# Altium footprint library SMD RUS IC.PcbLib: 31 footprints (part 2 of 2)
Each footprint in its own frame and in the unit in brackets; x right, y up, seen from the top. Pads: shape width x height; smd on the part's side, far side on the other; paste and mask are expansions set on the pad; w line width, h text height; cw(c..) or ccw(c..) is an arc to the next point about the centre after c.
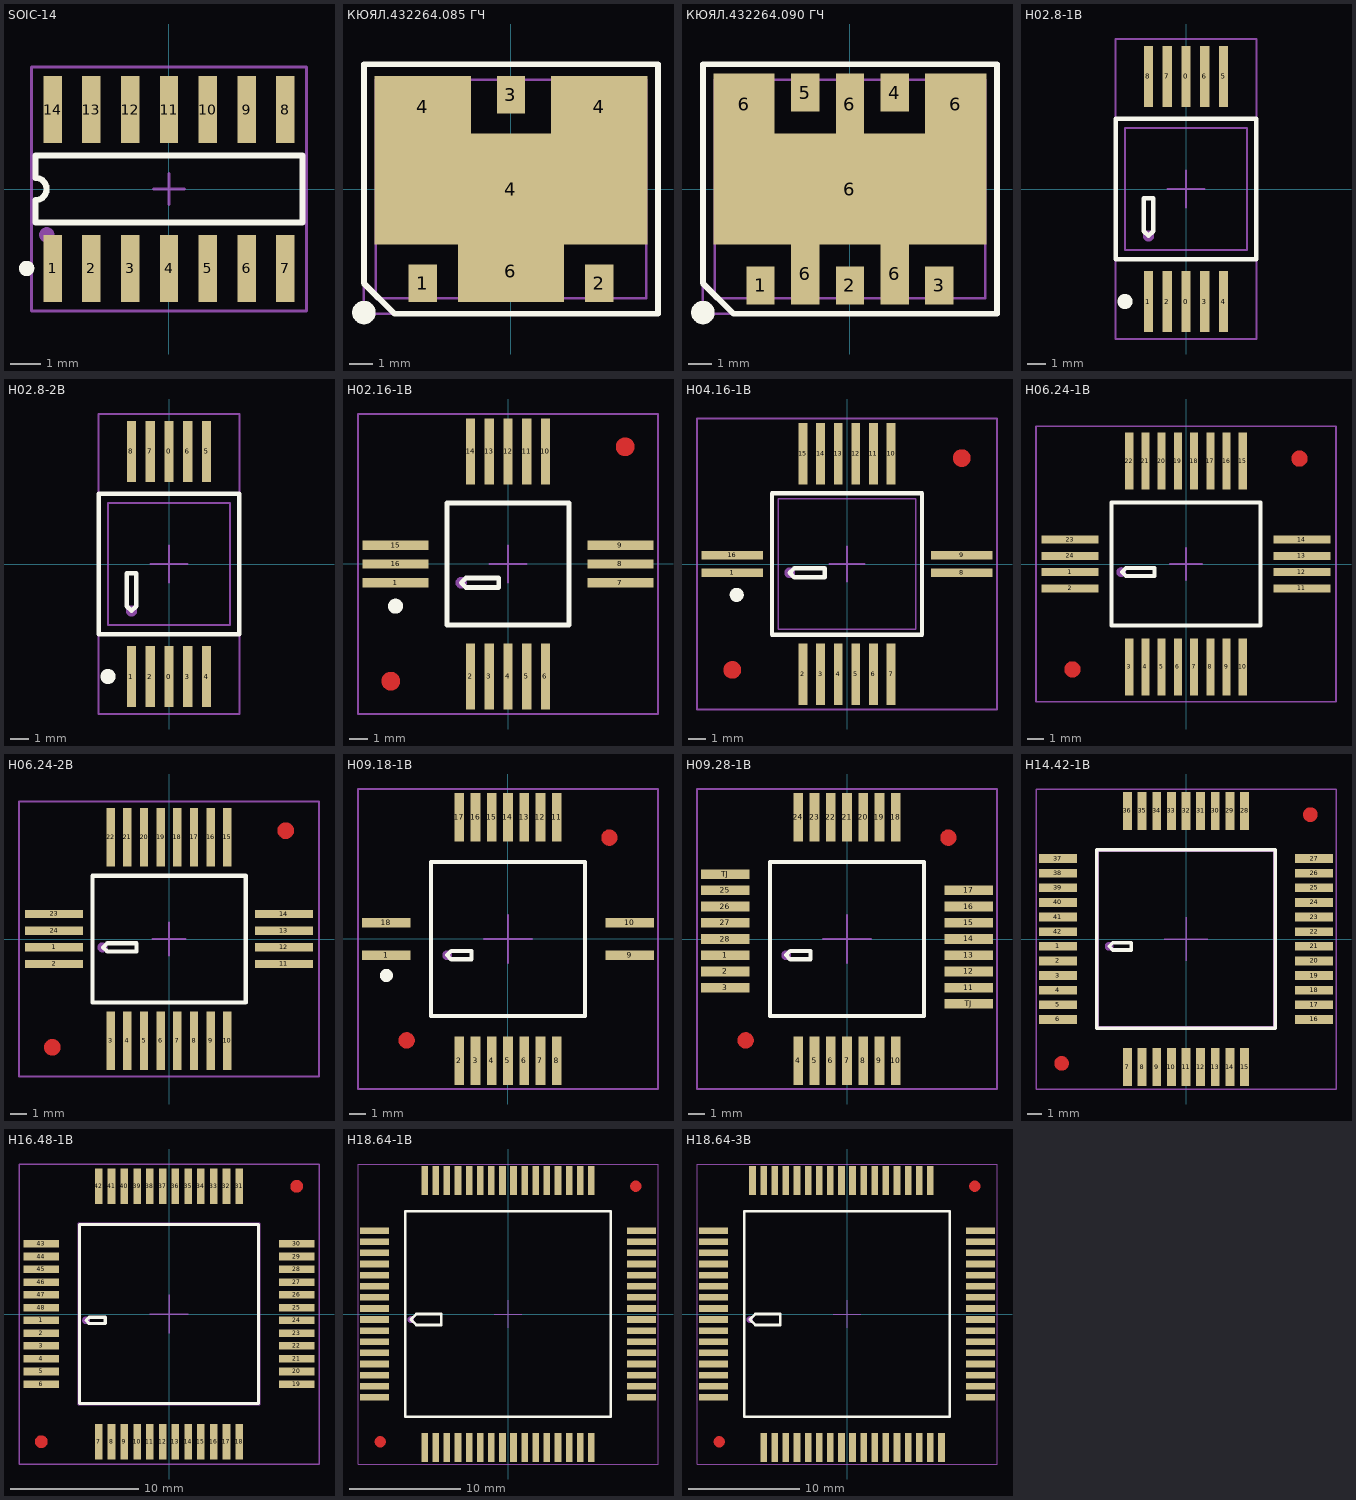
[diagram p1: the footprints below, top view; thin cyan lines are the x and y axes]

## SOIC-14 [mm] "Small Outline; 14 Leads; Body Width 3.9 mm; Pitch 1.27 mm"
height 1.75
pads (14):
  rect 0.6x2.2 smd: 1(-3.81,-2.6) 2(-2.54,-2.6) 3(-1.27,-2.6) 4(0,-2.6) 5(1.27,-2.6) 6(2.54,-2.6) 7(3.81,-2.6) 8(3.81,2.6) 9(2.54,2.6) 10(1.27,2.6) 11(0,2.6) 12(-1.27,2.6) 13(-2.54,2.6) 14(-3.81,2.6)
Top Overlay:
  circle w0.25: c-4.66,-2.6 r0.125
  lines w0.2: -4.375,-1.1 4.375,-1.1 4.375,1.1 -4.375,1.1 -4.375,0.367 cw(c-4.375,0) -4.375,-0.367 -4.375,-1.1
Mechanical 7:
  lines w0.05: -4.5,-4 -4.5,4 4.5,4 4.5,-4 -4.5,-4
  text ".Designator" at -1.5,-0.5 h1.5
Mechanical 13:
  circle w0.25: c-4,-1.5 r0.125
Mechanical 15:
  lines w0.1: -0.5,0 0.5,0 ; 0,-0.5 0,0.5 ; -4.5,-4 4.5,-4 4.5,4 -4.5,4 -4.5,-4
3D body "SOIC14N.step": height 1.7, standoff 0, extent -4.318,-3.023 4.318,3.175

## КЮЯЛ.432264.085 ГЧ [mm]
height 2.5
pads (7):
  rect 1.2x1.6 smd: 1(-3.75,-4) 2(3.75,-4) 3(0,4)
  rect 4.1x2.6 smd: 4(-3.75,3.5) 4(3.75,3.5)
  rect 11.6x4.7 smd: 4(0,0)
  rect 4.5x2.6 smd: 6(0,-3.5)
Top Overlay:
  circle w0.5: c-6.25,-5.25 r0.25
  lines w0.25: -6.25,-4 -4.95,-5.3 6.25,-5.3 6.25,5.3 -6.25,5.3 -6.25,-4
Mechanical 7:
  lines w0.05: -6.25,-5.3 6.25,-5.3 6.25,5.3 -6.25,5.3 -6.25,-5.3
  text ".Designator" at -2.999,-0.5 h2
Mechanical 13:
  circle w0.3: c-3.75,-4 r0.15
  lines w0.1: -5.75,-4.65 -5.75,4.65 5.75,4.65 5.75,-4.65 -5.75,-4.65
  text "Check!" at -3.75,-0.25 h1.52
Mechanical 15:
  lines w0.1: -1,0 1,0 ; 0,-1 0,1 ; -6.25,-5.3 6.25,-5.3 6.25,5.3 -6.25,5.3 -6.25,-5.3
3D body: height 2.2, standoff 2, extent -5.75,-4.65 5.75,4.65
3D body: height 2.6, standoff 2.2, extent -5.25,-4 5.25,4
3D body: height 2, standoff 0.01, extent -5.75,-4.65 5.75,4.65
3D body: height 2, standoff 0.01, extent 1.4,-4.7 2.4,-4.625
3D body: height 1, standoff 0.01, extent -0.5,-4.7 0.5,-4.625
3D body: height 1, standoff 0.01, extent 3.3,-4.7 4.3,-4.625
3D body: height 2, standoff 0.01, extent -5.712,4.625 -3.288,4.7
3D body: height 1, standoff 0.01, extent -2.4,4.625 -1.4,4.7
3D body: height 1, standoff 0.01, extent 1.4,4.625 2.4,4.7
3D body: height 2, standoff 0.01, extent -0.5,4.625 0.5,4.7
3D body: height 2, standoff 0.01, extent 3.287,4.625 5.713,4.7
3D body: height 2, standoff 0.01, extent -2.4,-4.7 -1.4,-4.625
3D body: height 1, standoff 0.01, extent -4.3,-4.7 -3.3,-4.625

## КЮЯЛ.432264.090 ГЧ [mm]
height 2.5
pads (11):
  rect 1.2x1.6 smd: 1(-3.8,-4.1) 2(0,-4.1) 3(3.8,-4.1) 4(1.9,4.1) 5(-1.9,4.1)
  rect 2.6x2.6 smd: 6(-4.5,3.6) 6(4.5,3.6)
  rect 1.2x2.6 smd: 6(-1.9,-3.6) 6(0,3.6) 6(1.9,-3.6)
  rect 11.6x4.7 smd: 6(0,0)
Top Overlay:
  circle w0.5: c-6.25,-5.25 r0.25
  lines w0.25: -6.25,-4 -6.25,5.3 6.25,5.3 6.25,-5.3 -4.95,-5.3 -6.25,-4
Mechanical 7:
  lines w0.05: -6.25,-5.3 6.25,-5.3 6.25,5.3 -6.25,5.3 -6.25,-5.3
  text ".Designator" at -2.999,-0.5 h2
Mechanical 13:
  circle w0.3: c-3.75,-4 r0.15
  lines w0.1: -5.75,-4.65 5.75,-4.65 5.75,4.65 -5.75,4.65 -5.75,-4.65
Mechanical 15:
  lines w0.1: -1,0 1,0 ; 0,-1 0,1 ; -6.25,-5.3 -6.25,5.3 6.25,5.3 6.25,-5.3 -6.25,-5.3
3D body: height 1, standoff 0.01, extent -4.3,-4.7 -3.3,-4.625
3D body: height 2, standoff 0.01, extent -2.4,-4.7 -1.4,-4.625
3D body: height 2, standoff 0.01, extent 3.287,4.625 5.713,4.7
3D body: height 2, standoff 0.01, extent -0.5,4.625 0.5,4.7
3D body: height 1, standoff 0.01, extent 1.4,4.625 2.4,4.7
3D body: height 1, standoff 0.01, extent -2.4,4.625 -1.4,4.7
3D body: height 2, standoff 0.01, extent -5.712,4.625 -3.288,4.7
3D body: height 1, standoff 0.01, extent 3.3,-4.7 4.3,-4.625
3D body: height 1, standoff 0.01, extent -0.5,-4.7 0.5,-4.625
3D body: height 2, standoff 0.01, extent 1.4,-4.7 2.4,-4.625
3D body: height 2, standoff 0.01, extent -5.75,-4.65 5.75,4.65
3D body: height 2.6, standoff 2.2, extent -5.25,-4 5.25,4
3D body: height 2.2, standoff 2, extent -5.75,-4.65 5.75,4.65

## Н02.8-1В [mm]
height 2.9
pads (10):
  rect 0.5x3.25 smd: 0(0,-6) 0(0,6) 1(-2,-6) 2(-1,-6) 3(1,-6) 4(2,-6) 5(2,6) 6(1,6) 7(-1,6) 8(-2,6)
Top Overlay:
  circle w0.4: c-3.25,-6 r0.2
  lines w0.25: -3.75,-3.75 3.75,-3.75 3.75,3.75 -3.75,3.75 -3.75,-3.75 ; -2.25,-2.25 -2,-2.5 -1.75,-2.25 -1.75,-0.5 -2.25,-0.5 -2.25,-2.25
Mechanical 7:
  lines w0.05: -3.75,-8 3.75,-8 3.75,8 -3.75,8 -3.75,-8
  text ".Designator" at -2.999,-0.5 h2
Mechanical 13:
  circle w0.3: c-2,-2.5 r0.15
  lines w0.1: -3.25,-3.25 -3.25,3.25 3.25,3.25 3.25,-3.25 -3.25,-3.25
Mechanical 15:
  lines w0.1: -1,0 1,0 ; 0,-1 0,1 ; -3.75,-8 -3.75,8 3.75,8 3.75,-8 -3.75,-8
3D body "Н02.8-1В.STEP": height 3.1, standoff 0.2, extent -3.25,-7.5 3.25,7.5

## Н02.8-2В [mm]
height 2.9
pads (10):
  rect 0.5x3.25 smd: 0(0,-6) 0(0,6) 1(-2,-6) 2(-1,-6) 3(1,-6) 4(2,-6) 5(2,6) 6(1,6) 7(-1,6) 8(-2,6)
Top Overlay:
  circle w0.4: c-3.25,-6 r0.2
  lines w0.25: -3.75,-3.75 -3.75,3.75 3.75,3.75 3.75,-3.75 -3.75,-3.75 ; -2.25,-2.25 -2.25,-0.5 -1.75,-0.5 -1.75,-2.25 -2,-2.5 -2.25,-2.25
Mechanical 7:
  lines w0.05: -3.75,-8 3.75,-8 3.75,8 -3.75,8 -3.75,-8
  text ".Designator" at -2.999,-0.5 h2
Mechanical 13:
  circle w0.3: c-2,-2.5 r0.15
  lines w0.1: -3.25,-3.25 3.25,-3.25 3.25,3.25 -3.25,3.25 -3.25,-3.25
Mechanical 15:
  lines w0.1: -1,0 1,0 ; 0,-1 0,1 ; -3.75,-8 3.75,-8 3.75,8 -3.75,8 -3.75,-8
3D body "Н02.8-1В.STEP": height 3.1, standoff 0.2, extent -3.25,-7.5 3.25,7.5

## Н02.16-1В [mm]
height 3
pads (16):
  rect 3.5x0.5 smd: 1(-6,-1) 7(6,-1) 8(6,0) 9(6,1) 15(-6,1) 16(-6,0)
  rect 0.5x3.5 smd: 2(-2,-6) 3(-1,-6) 4(0,-6) 5(1,-6) 6(2,-6) 10(2,6) 11(1,6) 12(0,6) 13(-1,6) 14(-2,6)
Top Layer:
  circle w0.5: c6.25,6.25 r0.25
  circle w0.5: c-6.25,-6.25 r0.25
Top Overlay:
  circle w0.4: c-6,-2.25 r0.2
  lines w0.25: -3.25,-3.25 3.25,-3.25 3.25,3.25 -3.25,3.25 -3.25,-3.25 ; -2.5,-1 -2.25,-1.25 -0.5,-1.25 -0.5,-0.75 -2.25,-0.75 -2.5,-1
Top Solder:
  circle w1: c6.25,6.25 r0.5
  circle w1: c-6.25,-6.25 r0.5
Mechanical 7:
  lines w0.05: -8,-8 8,-8 8,8 -8,8 -8,-8
  text ".Designator" at -2.999,-0.5 h2
Mechanical 13:
  circle w0.3: c-2.5,-1 r0.15
  lines w0.1: -3.25,-3.25 3.25,-3.25 3.25,3.25 -3.25,3.25 -3.25,-3.25
Mechanical 15:
  lines w0.1: -1,0 1,0 ; 0,-1 0,1 ; -8,-8 -8,8 8,8 8,-8 -8,-8
3D body: height 2.2, standoff 0.01, extent -3.25,-3.25 3.25,3.25
3D body: height 2.6, standoff 2.2, extent -3,-3 3,3
3D body: height 3, standoff 2.6, extent -2.75,-2.75 2.75,2.75
3D body: height 0.2, standoff 0, extent -2.2,-7.5 -1.8,-3.25
3D body: height 0.2, standoff 0, extent -1.2,-7.5 -0.8,-3.25
3D body: height 0.2, standoff 0, extent -0.2,-7.5 0.2,-3.25
3D body: height 0.2, standoff 0, extent 1.8,-7.5 2.2,-3.25
3D body: height 0.2, standoff 0, extent 0.8,-7.5 1.2,-3.25
3D body: height 0.2, standoff 0, extent 3.25,0.8 7.5,1.2
3D body: height 0.2, standoff 0, extent 3.25,-0.2 7.5,0.2
3D body: height 0.2, standoff 0, extent 3.25,-1.2 7.5,-0.8
3D body: height 0.2, standoff 0, extent -7.5,-1.2 -3.25,-0.8
3D body: height 0.2, standoff 0, extent -7.5,-0.2 -3.25,0.2
3D body: height 0.2, standoff 0, extent -7.5,0.8 -3.25,1.2
3D body: height 0.2, standoff 0, extent -2.2,3.25 -1.8,7.5
3D body: height 0.2, standoff 0, extent -1.2,3.25 -0.8,7.5
3D body: height 0.2, standoff 0, extent -0.2,3.25 0.2,7.5
3D body: height 0.2, standoff 0, extent 1.8,3.25 2.2,7.5
3D body: height 0.2, standoff 0, extent 0.8,3.25 1.2,7.5

## Н04.16-1В [mm]
pads (16):
  rect 3.5x0.5 smd: 1(-6.5,-0.5) 8(6.5,-0.5) 9(6.5,0.5) 16(-6.5,0.5)
  rect 0.5x3.5 smd: 2(-2.5,-6.25) 3(-1.5,-6.25) 4(-0.5,-6.25) 5(0.5,-6.25) 6(1.5,-6.25) 7(2.5,-6.25) 10(2.5,6.25) 11(1.5,6.25) 12(0.5,6.25) 13(-0.5,6.25) 14(-1.5,6.25) 15(-2.5,6.25)
Top Layer:
  circle w0.5: c6.5,6 r0.25
  circle w0.5: c-6.5,-6 r0.25
Top Overlay:
  circle w0.4: c-6.25,-1.75 r0.2
  lines w0.25: -4.25,-4 -4.25,4 4.25,4 4.25,-4 -4.25,-4 ; -3.25,-0.5 -3,-0.75 -1.25,-0.75 -1.25,-0.25 -3,-0.25 -3.25,-0.5
Top Solder:
  circle w1: c6.5,6 r0.5
  circle w1: c-6.5,-6 r0.5
Mechanical 7:
  lines w0.05: -8.5,-8.25 -8.5,8.25 8.5,8.25 8.5,-8.25 -8.5,-8.25
  text ".Designator" at -2.999,-0.5 h2
Mechanical 13:
  circle w0.3: c-3.25,-0.5 r0.15
  lines w0.1: -3.9,-3.7 3.9,-3.7 3.9,3.7 -3.9,3.7 -3.9,-3.7
Mechanical 15:
  lines w0.1: -1,0 1,0 ; 0,-1 0,1 ; -8.5,-8.25 -8.5,8.25 8.5,8.25 8.5,-8.25 -8.5,-8.25
3D body "Н04.16-1В.STEP": height 2.94, standoff 0.02, extent -8,-7.84 8,7.84

## Н06.24-1В [mm]
height 3
pads (24):
  rect 3.5x0.5 smd: 1(-7.15,-0.5) 2(-7.15,-1.5) 11(7.15,-1.5) 12(7.15,-0.5) 13(7.15,0.5) 14(7.15,1.5) 23(-7.15,1.5) 24(-7.15,0.5)
  rect 0.5x3.5 smd: 3(-3.5,-6.35) 4(-2.5,-6.35) 5(-1.5,-6.35) 6(-0.5,-6.35) 7(0.5,-6.35) 8(1.5,-6.35) 9(2.5,-6.35) 10(3.5,-6.35) 15(3.5,6.35) 16(2.5,6.35) 17(1.5,6.35) 18(0.5,6.35) 19(-0.5,6.35) 20(-1.5,6.35) 21(-2.5,6.35) 22(-3.5,6.35)
Top Layer:
  circle w0.5: c-7,-6.5 r0.25
  circle w0.5: c7,6.5 r0.25
Top Overlay:
  lines w0.25: -4.6,-3.8 -4.6,3.8 4.6,3.8 4.6,-3.8 -4.6,-3.8 ; -3.95,-0.5 -3.7,-0.75 -1.95,-0.75 -1.95,-0.25 -3.7,-0.25 -3.95,-0.5
Top Solder:
  circle w1: c-7,-6.5 r0.5
  circle w1: c7,6.5 r0.5
Mechanical 7:
  lines w0.05: -9.25,-8.5 -9.25,8.5 9.25,8.5 9.25,-8.5 -9.25,-8.5
  text ".Designator" at -2.999,-0.5 h2
Mechanical 13:
  circle w0.3: c-4,-0.5 r0.15
  lines w0.1: -4.6,-3.8 4.6,-3.8 4.6,3.8 -4.6,3.8 -4.6,-3.8
Mechanical 15:
  lines w0.1: -1,0 1,0 ; 0,-1 0,1 ; -9.25,-8.5 -9.25,8.5 9.25,8.5 9.25,-8.5 -9.25,-8.5
3D body "Н06.24-1В.STEP": height 3.02, standoff 0, extent -8.74,-7.94 8.74,7.94

## Н06.24-2В [mm]
height 3
pads (24):
  rect 3.5x0.5 smd: 1(-6.9,-0.5) 2(-6.9,-1.5) 11(6.9,-1.5) 12(6.9,-0.5) 13(6.9,0.5) 14(6.9,1.5) 23(-6.9,1.5) 24(-6.9,0.5)
  rect 0.5x3.5 smd: 3(-3.5,-6.1) 4(-2.5,-6.1) 5(-1.5,-6.1) 6(-0.5,-6.1) 7(0.5,-6.1) 8(1.5,-6.1) 9(2.5,-6.1) 10(3.5,-6.1) 15(3.5,6.1) 16(2.5,6.1) 17(1.5,6.1) 18(0.5,6.1) 19(-0.5,6.1) 20(-1.5,6.1) 21(-2.5,6.1) 22(-3.5,6.1)
Top Layer:
  circle w0.5: c-7,-6.5 r0.25
  circle w0.5: c7,6.5 r0.25
Top Overlay:
  lines w0.25: -4.6,-3.8 -4.6,3.8 4.6,3.8 4.6,-3.8 -4.6,-3.8 ; -3.95,-0.5 -3.7,-0.75 -1.95,-0.75 -1.95,-0.25 -3.7,-0.25 -3.95,-0.5
Top Solder:
  circle w1: c-7,-6.5 r0.5
  circle w1: c7,6.5 r0.5
Mechanical 7:
  lines w0.05: -9,-8.25 -9,8.25 9,8.25 9,-8.25 -9,-8.25
  text ".Designator" at -2.999,-0.5 h2
Mechanical 13:
  circle w0.3: c-4,-0.5 r0.15
  lines w0.1: -4.6,-3.8 4.6,-3.8 4.6,3.8 -4.6,3.8 -4.6,-3.8
Mechanical 15:
  lines w0.1: -1,0 1,0 ; 0,-1 0,1 ; -9,-8.25 -9,8.25 9,8.25 9,-8.25 -9,-8.25
3D body: height 2.2, standoff 0.2, extent -4.6,-3.8 4.6,3.8
3D body: height 2.6, standoff 2.2, extent -4.6,-3.8 4.6,3.8
3D body: height 3, standoff 2.6, extent -4.6,-3.8 4.6,3.8
3D body: height 0.2, standoff 0, extent -3.7,-7.7 -3.3,-3.8
3D body: height 0.2, standoff 0, extent -2.7,-7.7 -2.3,-3.8
3D body: height 0.2, standoff 0, extent -1.7,-7.7 -1.3,-3.8
3D body: height 0.2, standoff 0, extent 1.3,-7.7 1.7,-3.8
3D body: height 0.2, standoff 0, extent 0.3,-7.7 0.7,-3.8
3D body: height 0.2, standoff 0, extent -0.7,-7.7 -0.3,-3.8
3D body: height 0.2, standoff 0, extent 3.3,-7.7 3.7,-3.8
3D body: height 0.2, standoff 0, extent 2.3,-7.7 2.7,-3.8
3D body: height 0.2, standoff 0, extent 4.6,1.3 8.5,1.7
3D body: height 0.2, standoff 0, extent 4.6,0.3 8.5,0.7
3D body: height 0.2, standoff 0, extent 4.6,-0.7 8.5,-0.3
3D body: height 0.2, standoff 0, extent 4.6,-1.7 8.5,-1.3
3D body: height 0.2, standoff 0, extent -8.5,-1.7 -4.6,-1.3
3D body: height 0.2, standoff 0, extent -8.5,-0.7 -4.6,-0.3
3D body: height 0.2, standoff 0, extent -8.5,0.3 -4.6,0.7
3D body: height 0.2, standoff 0, extent -8.5,1.3 -4.6,1.7
3D body: height 0.2, standoff 0, extent 2.3,3.8 2.7,7.7
3D body: height 0.2, standoff 0, extent 3.3,3.8 3.7,7.7
3D body: height 0.2, standoff 0, extent -0.7,3.8 -0.3,7.7
3D body: height 0.2, standoff 0, extent 0.3,3.8 0.7,7.7
3D body: height 0.2, standoff 0, extent 1.3,3.8 1.7,7.7
3D body: height 0.2, standoff 0, extent -1.7,3.8 -1.3,7.7
3D body: height 0.2, standoff 0, extent -2.7,3.8 -2.3,7.7
3D body: height 0.2, standoff 0, extent -3.7,3.8 -3.3,7.7

## Н09.18-1В [mm]
height 2.9
pads (18):
  rect 3x0.6 smd: 1(-7.5,-1) 9(7.5,-1) 10(7.5,1) 18(-7.5,1)
  rect 0.6x3 smd: 2(-3,-7.5) 3(-2,-7.5) 4(-1,-7.5) 5(0,-7.5) 6(1,-7.5) 7(2,-7.5) 8(3,-7.5) 11(3,7.5) 12(2,7.5) 13(1,7.5) 14(0,7.5) 15(-1,7.5) 16(-2,7.5) 17(-3,7.5)
Top Layer:
  circle w0.5: c-6.25,-6.25 r0.25
  circle w0.5: c6.25,6.25 r0.25
Top Overlay:
  circle w0.4: c-7.5,-2.25 r0.2
  lines w0.25: -4.75,-4.75 -4.75,4.75 4.75,4.75 4.75,-4.75 -4.75,-4.75 ; -3.75,-1 -3.5,-0.75 -2.25,-0.75 -2.25,-1.25 -3.5,-1.25 -3.75,-1
Top Solder:
  circle w1: c-6.25,-6.25 r0.5
  circle w1: c6.25,6.25 r0.5
Mechanical 7:
  lines w0.05: -9.25,-9.25 9.25,-9.25 9.25,9.25 -9.25,9.25 -9.25,-9.25
  text ".Designator" at -2.999,-0.5 h2
Mechanical 13:
  circle w0.3: c-3.75,-1 r0.15
  lines w0.1: -4.75,-4.75 -4.75,4.75 4.75,4.75 4.75,-4.75 -4.75,-4.75
Mechanical 15:
  lines w0.1: -1.5,0 1.5,0 ; 0,-1.5 0,1.5 ; -9.25,-9.25 -9.25,9.25 9.25,9.25 9.25,-9.25 -9.25,-9.25
3D body "Н09.18-1ВН.STEP": height 2.92, standoff 0.02, extent -8.2,-8.2 8.2,8.2

## Н09.28-1В [mm]
pads (30):
  rect 3x0.6 smd: 1(-7.5,-1) 2(-7.5,-2) 3(-7.5,-3) 11(7.5,-3) 12(7.5,-2) 13(7.5,-1) 14(7.5,0) 15(7.5,1) 16(7.5,2) 17(7.5,3) 25(-7.5,3) 26(-7.5,2) 27(-7.5,1) 28(-7.5,0) TJ(-7.5,4) TJ(7.5,-4)
  rect 0.6x3 smd: 4(-3,-7.5) 5(-2,-7.5) 6(-1,-7.5) 7(0,-7.5) 8(1,-7.5) 9(2,-7.5) 10(3,-7.5) 18(3,7.5) 19(2,7.5) 20(1,7.5) 21(0,7.5) 22(-1,7.5) 23(-2,7.5) 24(-3,7.5)
Top Layer:
  circle w0.5: c6.25,6.25 r0.25
  circle w0.5: c-6.25,-6.25 r0.25
Top Overlay:
  lines w0.25: -4.75,-4.75 4.75,-4.75 4.75,4.75 -4.75,4.75 -4.75,-4.75 ; -3.75,-1 -3.5,-1.25 -2.25,-1.25 -2.25,-0.75 -3.5,-0.75 -3.75,-1
Top Solder:
  circle w1: c6.25,6.25 r0.5
  circle w1: c-6.25,-6.25 r0.5
Mechanical 7:
  lines w0.05: -9.25,-9.25 -9.25,9.25 9.25,9.25 9.25,-9.25 -9.25,-9.25
  text ".Designator" at -2.999,-0.5 h2
Mechanical 13:
  circle w0.3: c-3.75,-1 r0.15
  lines w0.1: -4.75,-4.75 4.75,-4.75 4.75,4.75 -4.75,4.75 -4.75,-4.75
Mechanical 15:
  lines w0.1: -1.5,0 1.5,0 ; 0,-1.5 0,1.5 ; -9.25,-9.25 9.25,-9.25 9.25,9.25 -9.25,9.25 -9.25,-9.25
3D body: height 2.5, standoff 0.2, extent -4.75,-4.75 4.75,4.75
3D body: height 2.7, standoff 2.5, extent -4.25,-4.25 4.25,4.25
3D body: height 3, standoff 2.5, extent -4,-4 4,4
3D body: height 0.2, standoff 0, extent -8.75,3.75 -4.75,4.25
3D body: height 0.2, standoff 0, extent -8.75,2.75 -4.75,3.25
3D body: height 0.2, standoff 0, extent -8.75,0.75 -4.75,1.25
3D body: height 0.2, standoff 0, extent -8.75,1.75 -4.75,2.25
3D body: height 0.2, standoff 0, extent -8.75,-1.25 -4.75,-0.75
3D body: height 0.2, standoff 0, extent -8.75,-0.25 -4.75,0.25
3D body: height 0.2, standoff 0, extent -8.75,-3.25 -4.75,-2.75
3D body: height 0.2, standoff 0, extent -8.75,-2.25 -4.75,-1.75
3D body: height 0.2, standoff 0, extent 4.75,-3.25 8.75,-2.75
3D body: height 0.2, standoff 0, extent 4.75,-4.25 8.75,-3.75
3D body: height 0.2, standoff 0, extent 4.75,-1.25 8.75,-0.75
3D body: height 0.2, standoff 0, extent 4.75,-2.25 8.75,-1.75
3D body: height 0.2, standoff 0, extent 4.75,0.75 8.75,1.25
3D body: height 0.2, standoff 0, extent 4.75,-0.25 8.75,0.25
3D body: height 0.2, standoff 0, extent 4.75,1.75 8.75,2.25
3D body: height 0.2, standoff 0, extent 4.75,2.75 8.75,3.25
3D body: height 0.2, standoff 0, extent 2.75,-8.75 3.25,-4.75
3D body: height 0.2, standoff 0, extent 0.75,-8.75 1.25,-4.75
3D body: height 0.2, standoff 0, extent 1.75,-8.75 2.25,-4.75
3D body: height 0.2, standoff 0, extent -1.25,-8.75 -0.75,-4.75
3D body: height 0.2, standoff 0, extent -0.25,-8.75 0.25,-4.75
3D body: height 0.2, standoff 0, extent -2.25,-8.75 -1.75,-4.75
3D body: height 0.2, standoff 0, extent -3.25,-8.75 -2.75,-4.75
3D body: height 0.2, standoff 0, extent -3.25,4.75 -2.75,8.75
3D body: height 0.2, standoff 0, extent -2.25,4.75 -1.75,8.75
3D body: height 0.2, standoff 0, extent -0.25,4.75 0.25,8.75
3D body: height 0.2, standoff 0, extent -1.25,4.75 -0.75,8.75
3D body: height 0.2, standoff 0, extent 1.75,4.75 2.25,8.75
3D body: height 0.2, standoff 0, extent 0.75,4.75 1.25,8.75
3D body: height 0.2, standoff 0, extent 2.75,4.75 3.25,8.75

## Н14.42-1В [mm]
height 3
pads (42):
  rect 2.6x0.6 smd: 1(-8.75,-0.5) 2(-8.75,-1.5) 3(-8.75,-2.5) 4(-8.75,-3.5) 5(-8.75,-4.5) 6(-8.75,-5.5) 16(8.75,-5.5) 17(8.75,-4.5) 18(8.75,-3.5) 19(8.75,-2.5) 20(8.75,-1.5) 21(8.75,-0.5) 22(8.75,0.5) 23(8.75,1.5) 24(8.75,2.5) 25(8.75,3.5) 26(8.75,4.5) 27(8.75,5.5) 37(-8.75,5.5) 38(-8.75,4.5) 39(-8.75,3.5) 40(-8.75,2.5) 41(-8.75,1.5) 42(-8.75,0.5)
  rect 0.6x2.6 smd: 7(-4,-8.75) 8(-3,-8.75) 9(-2,-8.75) 10(-1,-8.75) 11(0,-8.75) 12(1,-8.75) 13(2,-8.75) 14(3,-8.75) 15(4,-8.75) 28(4,8.75) 29(3,8.75) 30(2,8.75) 31(1,8.75) 32(0,8.75) 33(-1,8.75) 34(-2,8.75) 35(-3,8.75) 36(-4,8.75)
Top Layer:
  circle w0.5: c8.5,8.5 r0.25
  circle w0.5: c-8.5,-8.5 r0.25
Top Overlay:
  lines w0.25: -6.1,-6.1 6.1,-6.1 6.1,6.1 -6.1,6.1 -6.1,-6.1 ; -5.25,-0.5 -5,-0.75 -3.75,-0.75 -3.75,-0.25 -5,-0.25 -5.25,-0.5
Top Solder:
  circle w1: c8.5,8.5 r0.5
  circle w1: c-8.5,-8.5 r0.5
Mechanical 7:
  lines w0.05: -10.25,-10.25 10.25,-10.25 10.25,10.25 -10.25,10.25 -10.25,-10.25
  text ".Designator" at -2.999,-0.5 h2
Mechanical 13:
  circle w0.3: c-5.25,-0.5 r0.15
  lines w0.1: -6,-6 -6,6 6,6 6,-6 -6,-6
Mechanical 15:
  lines w0.1: -1.5,0 1.5,0 ; 0,-1.5 0,1.5 ; -10.25,-10.25 10.25,-10.25 10.25,10.25 -10.25,10.25 -10.25,-10.25
3D body "User Library-H14_42-1B.step": height 3.05, standoff 0.04, extent -7.5,-7.5 7.5,7.5

## Н16.48-1В [mm]
height 3
pads (48):
  rect 2.8x0.6 smd: 1(-10,-0.5) 2(-10,-1.5) 3(-10,-2.5) 4(-10,-3.5) 5(-10,-4.5) 6(-10,-5.5) 19(10,-5.5) 20(10,-4.5) 21(10,-3.5) 22(10,-2.5) 23(10,-1.5) 24(10,-0.5) 25(10,0.5) 26(10,1.5) 27(10,2.5) 28(10,3.5) 29(10,4.5) 30(10,5.5) 43(-10,5.5) 44(-10,4.5) 45(-10,3.5) 46(-10,2.5) 47(-10,1.5) 48(-10,0.5)
  rect 0.6x2.8 smd: 7(-5.5,-10) 8(-4.5,-10) 9(-3.5,-10) 10(-2.5,-10) 11(-1.5,-10) 12(-0.5,-10) 13(0.5,-10) 14(1.5,-10) 15(2.5,-10) 16(3.5,-10) 17(4.5,-10) 18(5.5,-10) 31(5.5,10) 32(4.5,10) 33(3.5,10) 34(2.5,10) 35(1.5,10) 36(0.5,10) 37(-0.5,10) 38(-1.5,10) 39(-2.5,10) 40(-3.5,10) 41(-4.5,10) 42(-5.5,10)
Top Layer:
  circle w0.5: c10,10 r0.25
  circle w0.5: c-10,-10 r0.25
Top Overlay:
  lines w0.25: -7,-7 7,-7 7,7 -7,7 -7,-7 ; -6.5,-0.5 -6.25,-0.75 -5,-0.75 -5,-0.25 -6.25,-0.25 -6.5,-0.5
Top Solder:
  circle w1: c10,10 r0.5
  circle w1: c-10,-10 r0.5
Mechanical 7:
  lines w0.05: -11.75,-11.75 11.75,-11.75 11.75,11.75 -11.75,11.75 -11.75,-11.75
  text ".Designator" at -2.999,-0.5 h2
Mechanical 13:
  circle w0.3: c-6.5,-0.5 r0.15
  lines w0.1: -7.1,-7.1 -7.1,7.1 7.1,7.1 7.1,-7.1 -7.1,-7.1
Mechanical 15:
  lines w0.1: -1.5,0 1.5,0 ; 0,-1.5 0,1.5 ; -11.75,-11.75 11.75,-11.75 11.75,11.75 -11.75,11.75 -11.75,-11.75
3D body: height 0.2, standoff 0.01, extent -5.75,-11.25 -5.25,-7
3D body: height 0.2, standoff 0.01, extent -4.75,-11.25 -4.25,-7
3D body: height 0.2, standoff 0.01, extent -2.75,-11.25 -2.25,-7
3D body: height 0.2, standoff 0.01, extent -3.75,-11.25 -3.25,-7
3D body: height 0.2, standoff 0.01, extent -1.75,-11.25 -1.25,-7
3D body: height 0.2, standoff 0.01, extent 1.25,-11.25 1.75,-7
3D body: height 0.2, standoff 0.01, extent 0.25,-11.25 0.75,-7
3D body: height 0.2, standoff 0.01, extent 3.25,-11.25 3.75,-7
3D body: height 0.2, standoff 0.01, extent 2.25,-11.25 2.75,-7
3D body: height 0.2, standoff 0.01, extent 5.25,-11.25 5.75,-7
3D body: height 0.2, standoff 0.01, extent 4.25,-11.25 4.75,-7
3D body: height 0.2, standoff 0.01, extent -0.75,-11.25 -0.25,-7
3D body: height 0.2, standoff 0.01, extent 7,5.25 11.25,5.75
3D body: height 0.2, standoff 0.01, extent 7,4.25 11.25,4.75
3D body: height 0.2, standoff 0.01, extent 7,2.25 11.25,2.75
3D body: height 0.2, standoff 0.01, extent 7,3.25 11.25,3.75
3D body: height 0.2, standoff 0.01, extent 7,1.25 11.25,1.75
3D body: height 0.2, standoff 0.01, extent 7,-1.75 11.25,-1.25
3D body: height 0.2, standoff 0.01, extent 7,-0.75 11.25,-0.25
3D body: height 0.2, standoff 0.01, extent 7,-3.75 11.25,-3.25
3D body: height 0.2, standoff 0.01, extent 7,-2.75 11.25,-2.25
3D body: height 0.2, standoff 0.01, extent 7,-5.75 11.25,-5.25
3D body: height 0.2, standoff 0.01, extent 7,-4.75 11.25,-4.25
3D body: height 0.2, standoff 0.01, extent 7,0.25 11.25,0.75
3D body: height 0.2, standoff 0.01, extent 0.25,7 0.75,11.25
3D body: height 0.2, standoff 0.01, extent -4.75,7 -4.25,11.25
3D body: height 0.2, standoff 0.01, extent -5.75,7 -5.25,11.25
3D body: height 0.2, standoff 0.01, extent -2.75,7 -2.25,11.25
3D body: height 0.2, standoff 0.01, extent -3.75,7 -3.25,11.25
3D body: height 0.2, standoff 0.01, extent -0.75,7 -0.25,11.25
3D body: height 0.2, standoff 0.01, extent -1.75,7 -1.25,11.25
3D body: height 0.2, standoff 0.01, extent 1.25,7 1.75,11.25
3D body: height 0.2, standoff 0.01, extent 3.25,7 3.75,11.25
3D body: height 0.2, standoff 0.01, extent 2.25,7 2.75,11.25
3D body: height 0.2, standoff 0.01, extent 4.25,7 4.75,11.25
3D body: height 0.2, standoff 0.01, extent 5.25,7 5.75,11.25
3D body: height 0.2, standoff 0, extent -11.25,-0.75 -7,-0.25
3D body: height 2.5, standoff 0.01, extent -7,-7 7,7
3D body: height 2.7, standoff 2.5, extent -5.75,-5.75 5.75,5.75
3D body: height 3, standoff 2.5, extent -5,-5 5,5
3D body: height 0.2, standoff 0.01, extent -11.25,-5.75 -7,-5.25
3D body: height 0.2, standoff 0.01, extent -11.25,-4.75 -7,-4.25
3D body: height 0.2, standoff 0.01, extent -11.25,-2.75 -7,-2.25
3D body: height 0.2, standoff 0.01, extent -11.25,-3.75 -7,-3.25
3D body: height 0.2, standoff 0.01, extent -11.25,-1.75 -7,-1.25
3D body: height 0.2, standoff 0.01, extent -11.25,1.25 -7,1.75
3D body: height 0.2, standoff 0.01, extent -11.25,0.25 -7,0.75
3D body: height 0.2, standoff 0.01, extent -11.25,3.25 -7,3.75
3D body: height 0.2, standoff 0.01, extent -11.25,2.25 -7,2.75
3D body: height 0.2, standoff 0.01, extent -11.25,5.25 -7,5.75
3D body: height 0.2, standoff 0.01, extent -11.25,4.25 -7,4.75

## Н18.64-1В [mm]
height 2.9
pads (64):
  rect 2.6x0.6 smd: 1(-12,-0.5) 2(-12,-1.5) 3(-12,-2.5) 4(-12,-3.5) 5(-12,-4.5) 6(-12,-5.5) 7(-12,-6.5) 8(-12,-7.5) 25(12,-7.5) 26(12,-6.5) 27(12,-5.5) 28(12,-4.5) 29(12,-3.5) 30(12,-2.5) 31(12,-1.5) 32(12,-0.5) 33(12,0.5) 34(12,1.5) 35(12,2.5) 36(12,3.5) 37(12,4.5) 38(12,5.5) 39(12,6.5) 40(12,7.5) 57(-12,7.5) 58(-12,6.5) 59(-12,5.5) 60(-12,4.5) 61(-12,3.5) 62(-12,2.5) 63(-12,1.5) 64(-12,0.5)
  rect 0.6x2.6 smd: 9(-7.5,-12) 10(-6.5,-12) 11(-5.5,-12) 12(-4.5,-12) 13(-3.5,-12) 14(-2.5,-12) 15(-1.5,-12) 16(-0.5,-12) 17(0.5,-12) 18(1.5,-12) 19(2.5,-12) 20(3.5,-12) 21(4.5,-12) 22(5.5,-12) 23(6.5,-12) 24(7.5,-12) 41(7.5,12) 42(6.5,12) 43(5.5,12) 44(4.5,12) 45(3.5,12) 46(2.5,12) 47(1.5,12) 48(0.5,12) 49(-0.5,12) 50(-1.5,12) 51(-2.5,12) 52(-3.5,12) 53(-4.5,12) 54(-5.5,12) 55(-6.5,12) 56(-7.5,12)
Top Layer:
  circle w0.5: c-11.5,-11.5 r0.25
  circle w0.5: c11.5,11.5 r0.25
Top Overlay:
  lines w0.25: -9.25,-9.25 -9.25,9.25 9.25,9.25 9.25,-9.25 -9.25,-9.25 ; -8.75,-0.5 -8.25,-1 -6,-1 -6,0 -8.25,0 -8.75,-0.5
Top Solder:
  circle w1: c-11.5,-11.5 r0.5
  circle w1: c11.5,11.5 r0.5
Mechanical 7:
  lines w0.05: -13.5,-13.5 13.5,-13.5 13.5,13.5 -13.5,13.5 -13.5,-13.5
  text ".Designator" at -2.999,-0.5 h2
Mechanical 13:
  circle w0.3: c-8.75,-0.5 r0.15
  lines w0.1: -9.25,-9.25 9.25,-9.25 9.25,9.25 -9.25,9.25 -9.25,-9.25
Mechanical 15:
  lines w0.1: -1.25,0 1.25,0 ; 0,-1.25 0,1.25 ; -13.5,-13.5 -13.5,13.5 13.5,13.5 13.5,-13.5 -13.5,-13.5
3D body: height 2.4, standoff 0.2, extent -9.25,-9.25 9.25,9.25
3D body: height 2.41, standoff 2.4, extent -9.25,-9.25 9.25,9.25
3D body: height 0.2, standoff 0, extent -7.675,-13.3 -7.325,-8.375
3D body: height 1, standoff 0.19, extent -7.8,-9.275 -7.2,-7.9
3D body: height 1, standoff 0.19, extent -6.8,-9.275 -6.2,-7.9
3D body: height 0.2, standoff 0, extent -6.675,-13.3 -6.325,-8.375
3D body: height 1, standoff 0.19, extent -5.8,-9.275 -5.2,-7.9
3D body: height 0.2, standoff 0, extent -5.675,-13.3 -5.325,-8.375
3D body: height 1, standoff 0.19, extent -4.8,-9.275 -4.2,-7.9
3D body: height 0.2, standoff 0, extent -4.675,-13.3 -4.325,-8.375
3D body: height 1, standoff 0.19, extent -3.8,-9.275 -3.2,-7.9
3D body: height 0.2, standoff 0, extent -3.675,-13.3 -3.325,-8.375
3D body: height 1, standoff 0.19, extent -2.8,-9.275 -2.2,-7.9
3D body: height 0.2, standoff 0, extent -2.675,-13.3 -2.325,-8.375
3D body: height 1, standoff 0.19, extent -1.8,-9.275 -1.2,-7.9
3D body: height 0.2, standoff 0, extent -1.675,-13.3 -1.325,-8.375
3D body: height 1, standoff 0.19, extent -0.8,-9.275 -0.2,-7.9
3D body: height 0.2, standoff 0, extent -0.675,-13.3 -0.325,-8.375
3D body: height 1, standoff 0.19, extent 0.2,-9.275 0.8,-7.9
3D body: height 0.2, standoff 0, extent 0.325,-13.3 0.675,-8.375
3D body: height 1, standoff 0.19, extent 1.2,-9.275 1.8,-7.9
3D body: height 0.2, standoff 0, extent 1.325,-13.3 1.675,-8.375
3D body: height 1, standoff 0.19, extent 2.2,-9.275 2.8,-7.9
3D body: height 0.2, standoff 0, extent 2.325,-13.3 2.675,-8.375
3D body: height 1, standoff 0.19, extent 3.2,-9.275 3.8,-7.9
3D body: height 0.2, standoff 0, extent 3.325,-13.3 3.675,-8.375
3D body: height 1, standoff 0.19, extent 4.2,-9.275 4.8,-7.9
3D body: height 0.2, standoff 0, extent 4.325,-13.3 4.675,-8.375
3D body: height 1, standoff 0.19, extent 5.2,-9.275 5.8,-7.9
3D body: height 0.2, standoff 0, extent 5.325,-13.3 5.675,-8.375
3D body: height 1, standoff 0.19, extent 6.2,-9.275 6.8,-7.9
3D body: height 0.2, standoff 0, extent 6.325,-13.3 6.675,-8.375
3D body: height 1, standoff 0.19, extent 7.2,-9.275 7.8,-7.9
3D body: height 0.2, standoff 0, extent 7.325,-13.3 7.675,-8.375
3D body: height 0.2, standoff 0, extent 8.375,7.325 13.3,7.675
3D body: height 1, standoff 0.19, extent 7.925,7.2 9.3,7.8
3D body: height 0.2, standoff 0, extent 8.375,6.325 13.3,6.675
3D body: height 1, standoff 0.19, extent 7.925,6.2 9.3,6.8
3D body: height 0.2, standoff 0, extent 8.375,5.325 13.3,5.675
3D body: height 1, standoff 0.19, extent 7.925,5.2 9.3,5.8
3D body: height 0.2, standoff 0, extent 8.375,4.325 13.3,4.675
3D body: height 1, standoff 0.19, extent 7.925,4.2 9.3,4.8
3D body: height 0.2, standoff 0, extent 8.375,3.325 13.3,3.675
3D body: height 1, standoff 0.19, extent 7.925,3.2 9.3,3.8
3D body: height 0.2, standoff 0, extent 8.375,2.325 13.3,2.675
3D body: height 1, standoff 0.19, extent 7.925,2.2 9.3,2.8
3D body: height 0.2, standoff 0, extent 8.375,1.325 13.3,1.675
3D body: height 1, standoff 0.19, extent 7.925,1.2 9.3,1.8
3D body: height 0.2, standoff 0, extent 8.375,0.325 13.3,0.675
3D body: height 1, standoff 0.19, extent 7.925,0.2 9.3,0.8
3D body: height 0.2, standoff 0, extent 8.375,-0.675 13.3,-0.325
3D body: height 1, standoff 0.19, extent 7.925,-0.8 9.3,-0.2
3D body: height 0.2, standoff 0, extent 8.375,-1.675 13.3,-1.325
3D body: height 1, standoff 0.19, extent 7.925,-1.8 9.3,-1.2
3D body: height 0.2, standoff 0, extent 8.375,-2.675 13.3,-2.325
3D body: height 1, standoff 0.19, extent 7.925,-2.8 9.3,-2.2
3D body: height 0.2, standoff 0, extent 8.375,-3.675 13.3,-3.325
3D body: height 1, standoff 0.19, extent 7.925,-3.8 9.3,-3.2
3D body: height 0.2, standoff 0, extent 8.375,-4.675 13.3,-4.325
3D body: height 1, standoff 0.19, extent 7.925,-4.8 9.3,-4.2
3D body: height 0.2, standoff 0, extent 8.375,-5.675 13.3,-5.325
3D body: height 1, standoff 0.19, extent 7.925,-5.8 9.3,-5.2
3D body: height 0.2, standoff 0, extent 8.375,-6.675 13.3,-6.325
3D body: height 1, standoff 0.19, extent 7.925,-6.8 9.3,-6.2
3D body: height 1, standoff 0.19, extent 7.925,-7.8 9.3,-7.2
3D body: height 0.2, standoff 0, extent 8.375,-7.675 13.3,-7.325
3D body: height 0.2, standoff 0, extent -7.675,8.375 -7.325,13.3
3D body: height 1, standoff 0.19, extent -7.8,7.9 -7.2,9.275
3D body: height 0.2, standoff 0, extent -6.675,8.375 -6.325,13.3
3D body: height 1, standoff 0.19, extent -6.8,7.9 -6.2,9.275
3D body: height 0.2, standoff 0, extent -5.675,8.375 -5.325,13.3
3D body: height 1, standoff 0.19, extent -5.8,7.9 -5.2,9.275
3D body: height 0.2, standoff 0, extent -4.675,8.375 -4.325,13.3
3D body: height 1, standoff 0.19, extent -4.8,7.9 -4.2,9.275
3D body: height 0.2, standoff 0, extent -3.675,8.375 -3.325,13.3
3D body: height 1, standoff 0.19, extent -3.8,7.9 -3.2,9.275
3D body: height 0.2, standoff 0, extent -2.675,8.375 -2.325,13.3
3D body: height 1, standoff 0.19, extent -2.8,7.9 -2.2,9.275
3D body: height 0.2, standoff 0, extent -1.675,8.375 -1.325,13.3
3D body: height 1, standoff 0.19, extent -1.8,7.9 -1.2,9.275
3D body: height 0.2, standoff 0, extent -0.675,8.375 -0.325,13.3
3D body: height 1, standoff 0.19, extent -0.8,7.9 -0.2,9.275
3D body: height 0.2, standoff 0, extent 0.325,8.375 0.675,13.3
3D body: height 1, standoff 0.19, extent 0.2,7.9 0.8,9.275
3D body: height 0.2, standoff 0, extent 1.325,8.375 1.675,13.3
3D body: height 1, standoff 0.19, extent 1.2,7.9 1.8,9.275
3D body: height 0.2, standoff 0, extent 2.325,8.375 2.675,13.3
3D body: height 1, standoff 0.19, extent 2.2,7.9 2.8,9.275
3D body: height 0.2, standoff 0, extent 3.325,8.375 3.675,13.3
3D body: height 1, standoff 0.19, extent 3.2,7.9 3.8,9.275
3D body: height 0.2, standoff 0, extent 4.325,8.375 4.675,13.3
3D body: height 1, standoff 0.19, extent 4.2,7.9 4.8,9.275
3D body: height 0.2, standoff 0, extent 5.325,8.375 5.675,13.3
3D body: height 1, standoff 0.19, extent 5.2,7.9 5.8,9.275
3D body: height 0.2, standoff 0, extent 6.325,8.375 6.675,13.3
3D body: height 1, standoff 0.19, extent 6.2,7.9 6.8,9.275
3D body: height 1, standoff 0.19, extent 7.2,7.9 7.8,9.275
3D body: height 0.2, standoff 0, extent 7.325,8.375 7.675,13.3
3D body: height 0.2, standoff 0, extent -13.3,-7.675 -8.375,-7.325
3D body: height 1, standoff 0.19, extent -9.3,-7.8 -7.925,-7.2
3D body: height 0.2, standoff 0, extent -13.3,-6.675 -8.375,-6.325
3D body: height 1, standoff 0.19, extent -9.3,-6.8 -7.925,-6.2
3D body: height 0.2, standoff 0, extent -13.3,-5.675 -8.375,-5.325
3D body: height 1, standoff 0.19, extent -9.3,-5.8 -7.925,-5.2
3D body: height 0.2, standoff 0, extent -13.3,-4.675 -8.375,-4.325
3D body: height 1, standoff 0.19, extent -9.3,-4.8 -7.925,-4.2
3D body: height 0.2, standoff 0, extent -13.3,-3.675 -8.375,-3.325
3D body: height 1, standoff 0.19, extent -9.3,-3.8 -7.925,-3.2
3D body: height 0.2, standoff 0, extent -13.3,-2.675 -8.375,-2.325
3D body: height 1, standoff 0.19, extent -9.3,-2.8 -7.925,-2.2
3D body: height 0.2, standoff 0, extent -13.3,-1.675 -8.375,-1.325
3D body: height 1, standoff 0.19, extent -9.3,-1.8 -7.925,-1.2
3D body: height 0.2, standoff 0, extent -13.3,-0.9 -8.375,-0.325
3D body: height 1, standoff 0.19, extent -9.3,-1 -7.925,-0.2
3D body: height 0.2, standoff 0, extent -13.3,0.325 -8.375,0.675
3D body: height 1, standoff 0.19, extent -9.3,0.2 -7.925,0.8
3D body: height 0.2, standoff 0, extent -13.3,1.325 -8.375,1.675
3D body: height 1, standoff 0.19, extent -9.3,1.2 -7.925,1.8
3D body: height 0.2, standoff 0, extent -13.3,2.325 -8.375,2.675
3D body: height 1, standoff 0.19, extent -9.3,2.2 -7.925,2.8
3D body: height 0.2, standoff 0, extent -13.3,3.325 -8.375,3.675
3D body: height 1, standoff 0.19, extent -9.3,3.2 -7.925,3.8
3D body: height 0.2, standoff 0, extent -13.3,4.325 -8.375,4.675
3D body: height 1, standoff 0.19, extent -9.3,4.2 -7.925,4.8
3D body: height 0.2, standoff 0, extent -13.3,5.325 -8.375,5.675
3D body: height 1, standoff 0.19, extent -9.3,5.2 -7.925,5.8
3D body: height 0.2, standoff 0, extent -13.3,6.325 -8.375,6.675
3D body: height 1, standoff 0.19, extent -9.3,6.2 -7.925,6.8
3D body: height 1, standoff 0.19, extent -9.3,7.2 -7.925,7.8
3D body: height 0.2, standoff 0, extent -13.3,7.325 -8.375,7.675
3D body: height 2.6, standoff 2.41, extent -9,-9 9,9
3D body: height 2.8, standoff 2.6, extent -7.5,-7.5 7.5,7.5

## Н18.64-3В [mm]
height 3
pads (66):
  rect 2.6x0.6 smd: 1(-12,-0.5) 2(-12,-1.5) 3(-12,-2.5) 4(-12,-3.5) 5(-12,-4.5) 6(-12,-5.5) 7(-12,-6.5) 8(-12,-7.5) 25(12,-7.5) 26(12,-6.5) 27(12,-5.5) 28(12,-4.5) 29(12,-3.5) 30(12,-2.5) 31(12,-1.5) 32(12,-0.5) 33(12,0.5) 34(12,1.5) 35(12,2.5) 36(12,3.5) 37(12,4.5) 38(12,5.5) 39(12,6.5) 40(12,7.5) 57(-12,7.5) 58(-12,6.5) 59(-12,5.5) 60(-12,4.5) 61(-12,3.5) 62(-12,2.5) 63(-12,1.5) 64(-12,0.5)
  rect 0.6x2.6 smd: 9(-7.5,-12) 10(-6.5,-12) 11(-5.5,-12) 12(-4.5,-12) 13(-3.5,-12) 14(-2.5,-12) 15(-1.5,-12) 16(-0.5,-12) 17(0.5,-12) 18(1.5,-12) 19(2.5,-12) 20(3.5,-12) 21(4.5,-12) 22(5.5,-12) 23(6.5,-12) 24(7.5,-12) 41(7.5,12) 42(6.5,12) 43(5.5,12) 44(4.5,12) 45(3.5,12) 46(2.5,12) 47(1.5,12) 48(0.5,12) 49(-0.5,12) 50(-1.5,12) 51(-2.5,12) 52(-3.5,12) 53(-4.5,12) 54(-5.5,12) 55(-6.5,12) 56(-7.5,12) TJ(-8.5,12) TJ(8.5,-12)
Top Layer:
  circle w0.5: c-11.5,-11.5 r0.25
  circle w0.5: c11.5,11.5 r0.25
Top Overlay:
  lines w0.25: -9.25,-9.25 -9.25,9.25 9.25,9.25 9.25,-9.25 -9.25,-9.25 ; -8.75,-0.5 -8.25,-1 -6,-1 -6,0 -8.25,0 -8.75,-0.5
Top Solder:
  circle w1: c-11.5,-11.5 r0.5
  circle w1: c11.5,11.5 r0.5
Mechanical 7:
  lines w0.05: -13.5,-13.5 -13.5,13.5 13.5,13.5 13.5,-13.5 -13.5,-13.5
  text ".Designator" at -2.999,-0.5 h2
Mechanical 13:
  circle w0.3: c-8.75,-0.5 r0.15
  lines w0.1: -9.25,-9.25 9.25,-9.25 9.25,9.25 -9.25,9.25 -9.25,-9.25
Mechanical 15:
  lines w0.1: -1.25,0 1.25,0 ; 0,-1.25 0,1.25 ; -13.5,-13.5 -13.5,13.5 13.5,13.5 13.5,-13.5 -13.5,-13.5
3D body "User Library-H18_64-3B.step": height 3.08, standoff 0.03, extent -10.65,-10.65 10.65,10.65